# Altium footprint library SamacSys.PcbLib: 1008 footprints (part 16 of 63)
Each footprint in its own frame and in the unit in brackets; x right, y up, seen from the top. Pads: shape width x height; smd on the part's side, far side on the other; paste and mask are expansions set on the pad; w line width, h text height; cw(c..) or ccw(c..) is an arc to the next point about the centre after c.
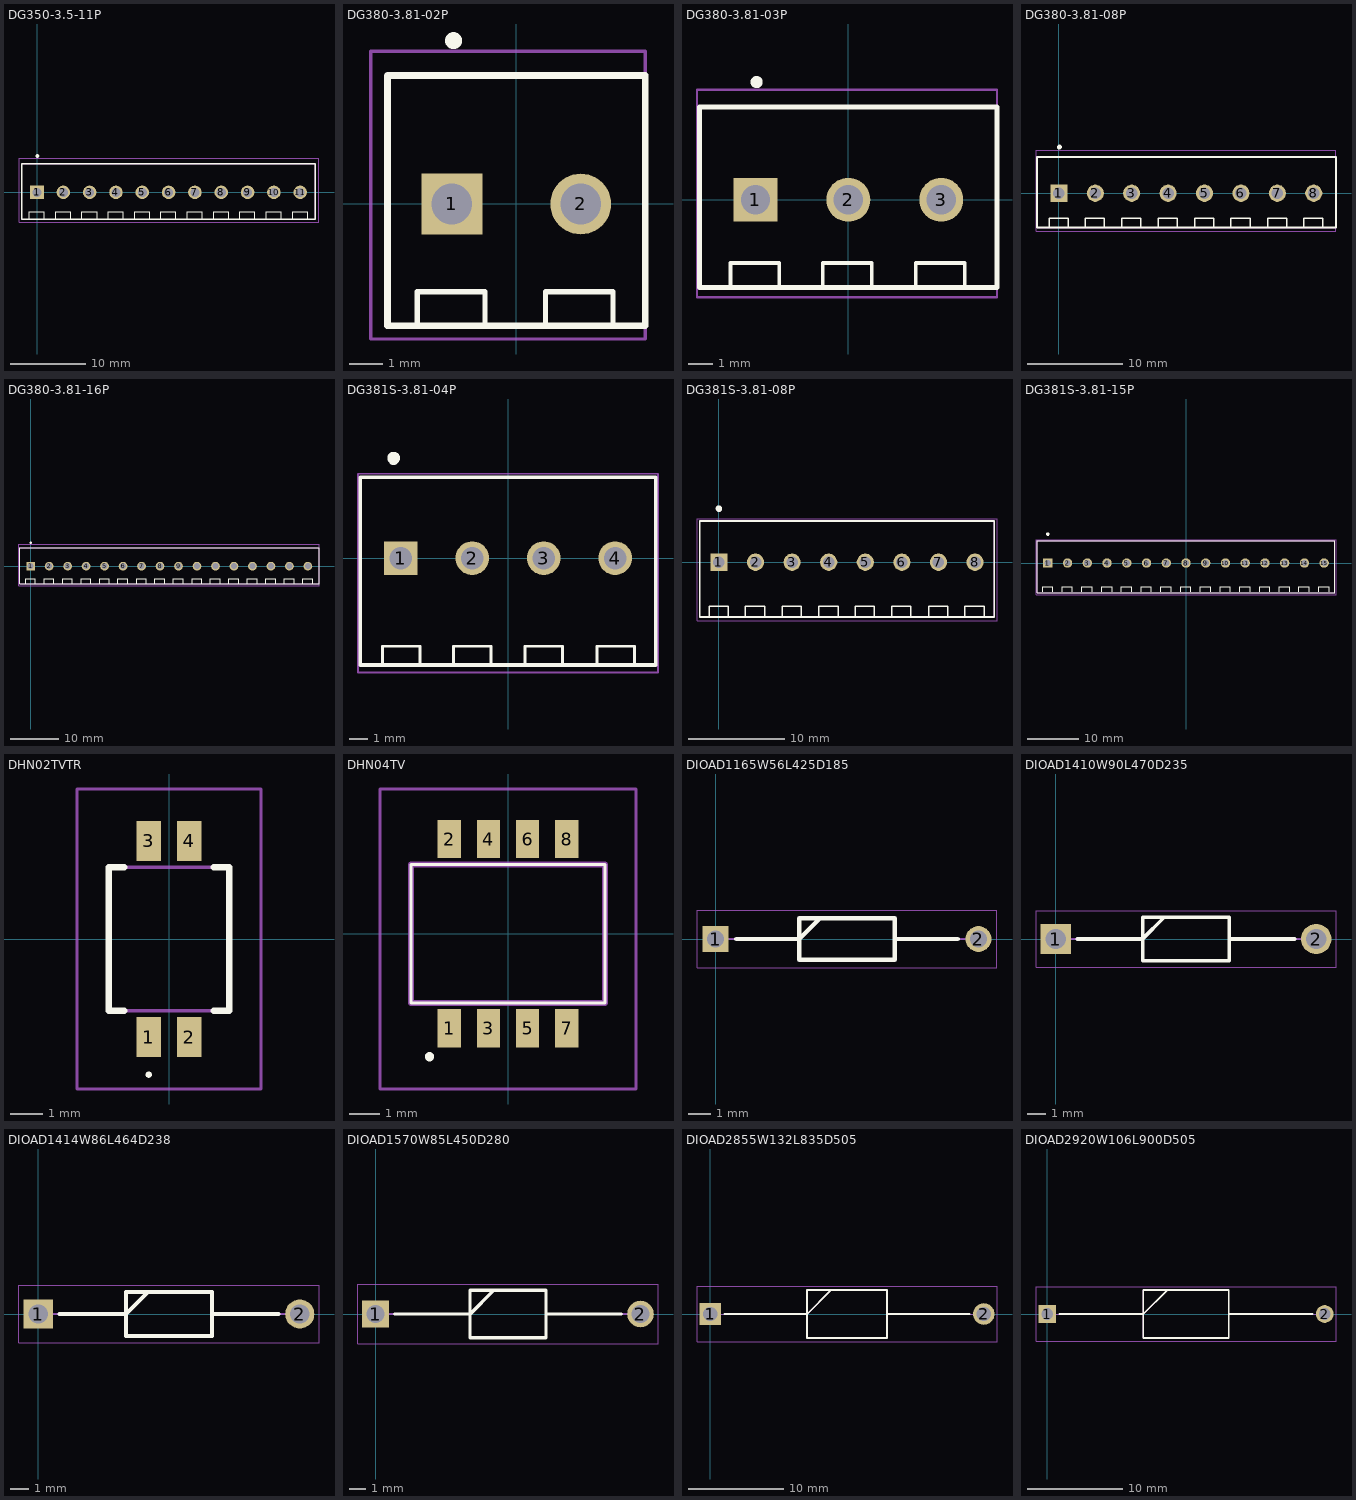
[diagram p15: the footprints below, top view; thin cyan lines are the x and y axes]

## DG350-3.5-11P [mm]
pads (11):
  rect 1.8x1.8 hole 1.2: 1(0,0)
  round 1.8 hole 1.2: 2(3.5,0) 3(7,0) 4(10.5,0) 5(14,0) 6(17.5,0) 7(21,0) 8(24.5,0) 9(28,0) 10(31.5,0) 11(35,0)
Top Overlay:
  lines w0.15: -1.022,-3.594 -1.022,-2.594 0.978,-2.594 0.978,-3.594 ; 2.478,-3.594 2.478,-2.594 4.478,-2.594 4.478,-3.594 ; 5.978,-3.594 5.978,-2.594 7.978,-2.594 7.978,-3.594 ; 9.478,-3.594 9.478,-2.594 11.478,-2.594 11.478,-3.594 ; 12.978,-3.594 12.978,-2.594 14.978,-2.594 14.978,-3.594 ; 16.478,-3.594 16.478,-2.594 18.478,-2.594 18.478,-3.594 ; 19.978,-3.594 19.978,-2.594 21.978,-2.594 21.978,-3.594 ; 23.478,-3.594 23.478,-2.594 25.478,-2.594 25.478,-3.594 ; 26.978,-3.594 26.978,-2.594 28.978,-2.594 28.978,-3.594 ; 30.478,-3.594 30.478,-2.594 32.478,-2.594 32.478,-3.594 ; 33.978,-3.594 33.978,-2.594 35.978,-2.594 35.978,-3.594
  lines w0.2: -2,-3.6 37,-3.6 37,3.8 -2,3.8 -2,-3.6
  lines w0.4: 0,4.826 cw(c0.05,4.826) 0.1,4.826 cw(c0.05,4.826) 0,4.826
Assembly:
  lines w0.1: -2,-3.6 37,-3.6 37,3.8 -2,3.8 -2,-3.6
Countryard:
  lines w0.1: -2.395,-3.991 37.5,-3.991 37.5,4.518 -2.395,4.518 -2.395,-3.991
3D body "DG380-3.5-11P-14-00A&Z(H).stp": height 10.51, standoff -3.49, extent -2,-3.6 37,3.8

## DG380-3.81-02P [mm]
pads (2):
  rect 1.8x1.8 hole 1.2: 1(-1.905,0)
  round 1.8 hole 1.2: 2(1.905,0)
Top Overlay:
  lines w0.15: -2.927,-3.594 -2.927,-2.594 -0.927,-2.594 -0.927,-3.594 ; 0.862,-3.594 0.862,-2.594 2.862,-2.594 2.862,-3.594
  lines w0.2: -3.81,-3.6 -3.81,3.8 3.81,3.8 3.81,-3.6 -3.81,-3.6
  lines w0.4: -1.905,4.826 ccw(c-1.855,4.826) -1.805,4.826 ccw(c-1.855,4.826) -1.905,4.826
Assembly:
  lines w0.1: -3.81,-3.6 3.81,-3.6 3.81,3.8 -3.81,3.8 -3.81,-3.6
Countryard:
  lines w0.1: -4.3,-3.991 -4.3,4.518 3.81,4.518 3.81,-3.991 -4.3,-3.991
3D body "DG381-3.81-02P-14-00A(H).stp": height 8.61, standoff -3.59, extent -4.234,-3.6 3.806,3.8

## DG380-3.81-03P [mm]
pads (3):
  rect 1.8x1.8 hole 1.2: 1(-3.81,0)
  round 1.8 hole 1.2: 2(0,0) 3(3.81,0)
Top Overlay:
  lines w0.15: -4.832,-3.594 -4.832,-2.594 -2.832,-2.594 -2.832,-3.594 ; -1.043,-3.594 -1.043,-2.594 0.957,-2.594 0.957,-3.594 ; 2.767,-3.594 2.767,-2.594 4.767,-2.594 4.767,-3.594
  lines w0.2: -6.096,-3.6 6.096,-3.6 6.096,3.8 -6.096,3.8 -6.096,-3.6
  lines w0.4: -3.81,4.826 cw(c-3.76,4.826) -3.71,4.826 cw(c-3.76,4.826) -3.81,4.826
Assembly:
  lines w0.1: -6.096,-3.6 6.096,-3.6 6.096,3.8 -6.096,3.8 -6.096,-3.6
Countryard:
  lines w0.1: -6.205,-3.991 6.096,-3.991 6.096,4.518 -6.205,4.518 -6.205,-3.991
3D body "DG380-3.81-03P-14-00A(H).stp": height 10.21, standoff -3.49, extent -6.09,-3.6 6.09,3.8

## DG380-3.81-08P [mm]
pads (8):
  rect 1.8x1.8 hole 1.2: 1(0,0)
  round 1.8 hole 1.2: 2(3.81,0) 3(7.62,0) 4(11.43,0) 5(15.24,0) 6(19.05,0) 7(22.86,0) 8(26.67,0)
Top Overlay:
  lines w0.15: -1.022,-3.594 -1.022,-2.594 0.978,-2.594 0.978,-3.594 ; 2.767,-3.594 2.767,-2.594 4.767,-2.594 4.767,-3.594 ; 6.577,-3.594 6.577,-2.594 8.577,-2.594 8.577,-3.594 ; 10.387,-3.594 10.387,-2.594 ; 10.408,-2.594 12.408,-2.594 12.408,-3.594 ; 14.197,-3.594 14.197,-2.594 16.197,-2.594 16.197,-3.594 ; 18.007,-3.594 18.007,-2.594 20.007,-2.594 20.007,-3.594 ; 21.838,-3.594 21.838,-2.594 23.838,-2.594 23.838,-3.594 ; 25.627,-3.594 25.627,-2.594 27.627,-2.594 27.627,-3.594
  lines w0.2: -2.286,-3.6 -2.286,3.8 29,3.8 29,-3.6 -2.286,-3.6
  lines w0.4: 0,4.826 ccw(c0.05,4.826) 0.1,4.826 ccw(c0.05,4.826) 0,4.826
Assembly:
  lines w0.1: -2.286,-3.6 -2.286,3.8 29,3.8 29,-3.6 -2.286,-3.6
Countryard:
  lines w0.1: -2.395,-3.991 -2.395,4.518 29,4.518 29,-3.991 -2.395,-3.991
3D body "DG380-3.81-08P-14-00A(H).stp": height 10.21, standoff -3.49, extent -2.28,-3.6 28.95,3.8

## DG380-3.81-16P [mm]
pads (16):
  rect 1.8x1.8 hole 1.2: 1(0,0)
  round 1.8 hole 1.2: 2(3.81,0) 3(7.62,0) 4(11.43,0) 5(15.24,0) 6(19.05,0) 7(22.86,0) 8(26.67,0) 9(30.48,0) 10(34.29,0) 11(38.1,0) 12(41.91,0) 13(45.72,0) 14(49.53,0) 15(53.34,0) 16(57.15,0)
Top Overlay:
  lines w0.15: -1.022,-3.594 -1.022,-2.594 0.978,-2.594 0.978,-3.594 ; 2.767,-3.594 2.767,-2.594 4.767,-2.594 4.767,-3.594 ; 6.577,-3.594 6.577,-2.594 8.577,-2.594 8.577,-3.594 ; 10.387,-3.594 10.387,-2.594 ; 10.408,-2.594 12.408,-2.594 12.408,-3.594 ; 14.197,-3.594 14.197,-2.594 16.197,-2.594 16.197,-3.594 ; 18.007,-3.594 18.007,-2.594 20.007,-2.594 20.007,-3.594 ; 21.838,-3.594 21.838,-2.594 23.838,-2.594 23.838,-3.594 ; 25.627,-3.594 25.627,-2.594 27.627,-2.594 27.627,-3.594 ; 29.437,-3.594 29.437,-2.594 31.437,-2.594 31.437,-3.594 ; 33.268,-3.594 33.268,-2.594 35.268,-2.594 35.268,-3.594 ; 37.057,-3.594 37.057,-2.594 39.057,-2.594 39.057,-3.594 ; 40.867,-3.594 40.867,-2.594 42.867,-2.594 42.867,-3.594 ; 44.698,-3.594 44.698,-2.594 46.698,-2.594 46.698,-3.594 ; 48.487,-3.594 48.487,-2.594 50.487,-2.594 50.487,-3.594 ; 52.297,-3.594 52.297,-2.594 54.297,-2.594 54.297,-3.594 ; 56.128,-3.594 56.128,-2.594 58.128,-2.594 58.128,-3.594
  lines w0.2: -2.286,-3.6 -2.286,3.8 59.436,3.8 59.436,-3.6 -2.286,-3.6
  lines w0.4: 0,4.826 ccw(c0.05,4.826) 0.1,4.826 ccw(c0.05,4.826) 0,4.826
Assembly:
  lines w0.1: -2.286,-3.6 -2.286,3.8 59.436,3.8 59.436,-3.6 -2.286,-3.6
Countryard:
  lines w0.1: -2.395,-3.991 -2.395,4.518 59.436,4.518 59.436,-3.991 -2.395,-3.991
3D body "DG380-3.81-16P-14-00A(H).stp": height 10.21, standoff -3.49, extent -2.28,-3.6 59.43,3.8

## DG381S-3.81-04P [mm]
pads (4):
  rect 1.8x1.8 hole 1.2: 1(-5.715,0)
  round 1.8 hole 1.2: 2(-1.905,0) 3(1.905,0)
  round 1.8 hole 1.2 unplated: 4(5.715,0)
Top Overlay:
  lines w0.15: -6.689,-5.7 -6.689,-4.7 -4.689,-4.7 -4.689,-5.7 ; -2.9,-5.7 -2.9,-4.7 -0.9,-4.7 -0.9,-5.7 ; 0.91,-5.7 0.91,-4.7 2.91,-4.7 2.91,-5.7 ; 4.741,-5.7 4.741,-4.7 6.741,-4.7 6.741,-5.7
  lines w0.2: -7.874,-5.7 -7.874,4.318 7.874,4.318 7.874,-5.7 -7.874,-5.7
  lines w0.4: -6.146,5.207 ccw(c-6.096,5.207) -6.046,5.207 ccw(c-6.096,5.334) -6.146,5.207
Assembly:
  lines w0.1: -7.874,-5.7 -7.874,4.318 7.874,4.318 7.874,-5.7 -7.874,-5.7
Countryard:
  lines w0.1: -8,-6.096 -8,4.5 8,4.5 8,-6.096 -8,-6.096
3D body "DG381S-3.81-04P-14-00A(H).stp": height 9.63, standoff -3.5, extent -7.715,-5.682 7.715,4.318

## DG381S-3.81-08P [mm]
pads (8):
  rect 1.8x1.8 hole 1.2: 1(0,0)
  round 1.8 hole 1.2: 2(3.81,0) 3(7.62,0)
  round 1.8 hole 1.2 unplated: 4(11.43,0) 5(15.24,0) 6(19.05,0) 7(22.86,0) 8(26.67,0)
Top Overlay:
  lines w0.15: -1.03,-5.572 -1.03,-4.572 0.97,-4.572 0.97,-5.572 ; 2.759,-5.572 2.759,-4.572 4.759,-4.572 4.759,-5.572 ; 6.569,-5.572 6.569,-4.572 8.569,-4.572 8.569,-5.572 ; 10.4,-5.572 10.4,-4.572 12.4,-4.572 12.4,-5.572 ; 14.189,-5.572 14.189,-4.572 16.189,-4.572 16.189,-5.572 ; 17.999,-5.572 17.999,-4.572 19.999,-4.572 19.999,-5.572 ; 21.83,-5.572 21.83,-4.572 23.83,-4.572 23.83,-5.572 ; 25.619,-5.572 25.619,-4.572 27.619,-4.572 27.619,-5.572
  lines w0.2: -2,-5.7 28.67,-5.7 28.67,4.3 -2,4.3 -2,-5.7
  lines w0.4: -0.05,5.461 cw(c0,5.588) 0.05,5.461 cw(c0,5.461) -0.05,5.461
Assembly:
  lines w0.1: -2,-5.7 -2,4.3 28.67,4.3 28.67,-5.7 -2,-5.7
Countryard:
  lines w0.1: -2.286,-6.096 28.956,-6.096 28.956,4.518 -2.286,4.518 -2.286,-6.096
3D body "DG381S-3.81-08P-14-00A(H).stp": height 9.63, standoff -3.5, extent -2,-5.7 28.67,4.3

## DG381S-3.81-15P [mm]
pads (15):
  rect 1.8x1.8 hole 1.2: 1(-26.67,0)
  round 1.8 hole 1.2: 2(-22.86,0) 3(-19.05,0)
  round 1.8 hole 1.2 unplated: 4(-15.24,0) 5(-11.43,0) 6(-7.62,0) 7(-3.81,0) 8(0,0) 9(3.81,0) 10(7.62,0) 11(11.43,0) 12(15.24,0) 13(19.05,0) 14(22.86,0) 15(26.67,0)
Top Overlay:
  lines w0.15: -27.7,-5.572 -27.7,-4.572 -25.7,-4.572 -25.7,-5.572 ; -23.911,-5.572 -23.911,-4.572 -21.911,-4.572 -21.911,-5.572 ; -20.101,-5.572 -20.101,-4.572 -18.101,-4.572 -18.101,-5.572 ; -16.27,-5.572 -16.27,-4.572 -14.27,-4.572 -14.27,-5.572 ; -12.481,-5.572 -12.481,-4.572 -10.481,-4.572 -10.481,-5.572 ; -8.671,-5.572 -8.671,-4.572 -6.671,-4.572 -6.671,-5.572 ; -4.84,-5.572 -4.84,-4.572 -2.84,-4.572 -2.84,-5.572 ; -1.051,-5.572 -1.051,-4.572 0.949,-4.572 0.949,-5.572 ; 2.759,-5.572 2.759,-4.572 4.759,-4.572 4.759,-5.572 ; 6.59,-5.572 6.59,-4.572 8.59,-4.572 8.59,-5.572 ; 10.379,-5.572 10.379,-4.572 12.379,-4.572 12.379,-5.572 ; 14.189,-5.572 14.189,-4.572 16.189,-4.572 16.189,-5.572 ; 18.02,-5.572 18.02,-4.572 20.02,-4.572 20.02,-5.572 ; 21.809,-5.572 21.809,-4.572 23.809,-4.572 23.809,-5.572 ; 25.619,-5.572 25.619,-4.572 27.619,-4.572 27.619,-5.572
  lines w0.2: -28.67,-5.7 28.67,-5.7 28.67,4.3 -28.67,4.3 -28.67,-5.7
  lines w0.4: -26.72,5.461 cw(c-26.67,5.588) -26.62,5.461 cw(c-26.67,5.461) -26.72,5.461
Assembly:
  lines w0.1: -28.67,-5.7 28.67,-5.7 28.67,4.3 -28.67,4.3 -28.67,-5.7
Countryard:
  lines w0.1: -28.956,-6.096 28.956,-6.096 28.956,4.518 -28.956,4.518 -28.956,-6.096
3D body "DG381S-3.81-15P-14-00A(H).stp": height 9.63, standoff -3.5, extent -28.67,-5.7 28.67,4.3

## DHN02TVTR [mm]
pads (4):
  rect 0.76x1.25 smd: 1(-0.635,-3.075) 2(0.635,-3.075) 3(-0.635,3.075) 4(0.635,3.075)
Top Overlay:
  lines w0.1: -0.635,-4.3 ccw(c-0.635,-4.25) -0.635,-4.2 ccw(c-0.635,-4.25) -0.635,-4.3
  lines w0.2: -1.4,-2.25 -1.885,-2.25 -1.885,2.25 -1.4,2.25 ; 1.4,-2.25 1.885,-2.25 1.885,2.25 1.4,2.25
Assembly:
  lines w0.1: -1.885,-2.25 -1.885,2.25 1.885,2.25 1.885,-2.25 -1.885,-2.25
Countryard:
  lines w0.1: -2.885,-4.7 -2.885,4.7 2.885,4.7 2.885,-4.7 -2.885,-4.7
3D body "DHN-02-T-V-T_R.stp": height 1.74, standoff 0, extent -1.885,-3.35 1.885,3.35

## DHN04TV [mm]
pads (8):
  rect 0.76x1.25 smd: 1(-1.905,-3.075) 2(-1.905,3.075) 3(-0.635,-3.075) 4(-0.635,3.075) 5(0.635,-3.075) 6(0.635,3.075) 7(1.905,-3.075) 8(1.905,3.075)
Top Overlay:
  lines w0.1: -3.155,-2.25 3.155,-2.25 3.155,2.25 -3.155,2.25 -3.155,-2.25
  lines w0.2: -2.6,-4 cw(c-2.55,-4) -2.5,-4 cw(c-2.55,-4) -2.6,-4
Assembly:
  lines w0.2: -3.155,-2.25 3.155,-2.25 3.155,2.25 -3.155,2.25 -3.155,-2.25
Countryard:
  lines w0.1: -4.155,-5.05 4.155,-5.05 4.155,4.7 -4.155,4.7 -4.155,-5.05
3D body "DHN-04-T-V.stp": height 1.74, standoff 0, extent -3.15,-3.35 3.15,3.35

## DIOAD1165W56L425D185 [mm]
pads (2):
  rect 1.15x1.15 hole 0.75: 1(0,0)
  round 1.15 hole 0.75: 2(11.7,0)
Top Overlay:
  lines w0.2: 0.925,0 3.725,0 4.65,0.925 ; 7.975,0 10.775,0 ; 3.725,-0.925 3.725,0.925 7.975,0.925 7.975,-0.925 3.725,-0.925
Assembly:
  lines w0.1: 0,0 3.725,0 4.65,0.925 ; 7.975,0 11.7,0 ; 3.725,-0.925 3.725,0.925 7.975,0.925 7.975,-0.925 3.725,-0.925
Countryard:
  lines w0.05: -0.825,-1.275 -0.825,1.275 12.525,1.275 12.525,-1.275 -0.825,-1.275
3D body "1N4148,133.stp": height 1.71, standoff 0.01, extent -24.652,-0.852 36.348,0.858

## DIOAD1410W90L470D235 [mm]
pads (2):
  rect 1.65x1.65 hole 1.1: 1(0,0)
  round 1.65 hole 1.1: 2(14.1,0)
Top Overlay:
  lines w0.2: 1.175,0 4.7,0 5.875,1.175 ; 9.4,0 12.925,0 ; 4.7,-1.175 9.4,-1.175 9.4,1.175 4.7,1.175 4.7,-1.175
Assembly:
  lines w0.1: 0,0 4.7,0 5.875,1.175 ; 9.4,0 14.1,0 ; 4.7,-1.175 9.4,-1.175 9.4,1.175 4.7,1.175 4.7,-1.175
Countryard:
  lines w0.05: -1.075,-1.525 15.175,-1.525 15.175,1.525 -1.075,1.525 -1.075,-1.525
3D body "1N5817.stp": height 2.7, standoff -2.7, extent -0.45,-1.34 14.55,1.34

## DIOAD1414W86L464D238 [mm]
pads (2):
  rect 1.575x1.575 hole 1.05: 1(0,0)
  round 1.575 hole 1.05: 2(14.1,0)
Top Overlay:
  lines w0.2: 1.138,0 4.732,0 5.92,1.188 ; 9.368,0 12.962,0 ; 4.732,-1.188 4.732,1.188 9.368,1.188 9.368,-1.188 4.732,-1.188
Assembly:
  lines w0.1: 0,0 4.732,0 5.92,1.188 ; 9.368,0 14.1,0 ; 4.732,-1.187 4.732,1.188 9.367,1.188 9.367,-1.187 4.732,-1.187
Countryard:
  lines w0.05: -1.038,-1.537 -1.038,1.538 15.137,1.538 15.137,-1.537 -1.038,-1.537
3D body "1N5819RL.stp": height 2.71, standoff -2.71, extent -0.43,-1.345 14.565,1.345

## DIOAD1570W85L450D280 [mm]
pads (2):
  rect 1.575x1.575 hole 1.05: 1(0,0)
  round 1.575 hole 1.05: 2(15.7,0)
Top Overlay:
  lines w0.2: 1.138,0 5.6,0 7,1.4 ; 10.1,0 14.562,0 ; 5.6,-1.4 5.6,1.4 10.1,1.4 10.1,-1.4 5.6,-1.4
Assembly:
  lines w0.1: 0,0 5.6,0 7,1.4 ; 10.1,0 15.7,0 ; 5.6,-1.4 5.6,1.4 10.1,1.4 10.1,-1.4 5.6,-1.4
Countryard:
  lines w0.05: -1.038,-1.75 -1.038,1.75 16.737,1.75 16.737,-1.75 -1.038,-1.75
3D body "1N4740A.stp": height 2.8, standoff -2.8, extent -0.425,-1.39 16.125,1.39

## DIOAD2855W132L835D505 [mm]
pads (2):
  rect 2.25x2.25 hole 1.5: 1(0,0)
  round 2.25 hole 1.5: 2(28.6,0)
Top Overlay:
  lines w0.2: 1.475,0 10.125,0 12.65,2.525 ; 18.475,0 27.125,0 ; 10.125,-2.525 10.125,2.525 18.475,2.525 18.475,-2.525 10.125,-2.525
Assembly:
  lines w0.1: 0,0 10.125,0 12.65,2.525 ; 18.475,0 28.6,0 ; 10.125,-2.525 10.125,2.525 18.475,2.525 18.475,-2.525 10.125,-2.525
Countryard:
  lines w0.05: -1.375,-2.875 -1.375,2.875 29.975,2.875 29.975,-2.875 -1.375,-2.875
3D body "1N5400-E3_54.stp": height 5.29, standoff -5.3, extent -0.66,-2.647 29.21,2.647

## DIOAD2920W106L900D505 [mm]
pads (2):
  rect 1.875x1.875 hole 1.25: 1(0,0)
  round 1.875 hole 1.25: 2(29.2,0)
Top Overlay:
  lines w0.2: 1.288,0 10.1,0 12.625,2.525 ; 19.1,0 27.912,0 ; 10.1,-2.525 10.1,2.525 19.1,2.525 19.1,-2.525 10.1,-2.525
Assembly:
  lines w0.1: 0,0 10.1,0 12.625,2.525 ; 19.1,0 29.2,0 ; 10.1,-2.525 10.1,2.525 19.1,2.525 19.1,-2.525 10.1,-2.525
Countryard:
  lines w0.05: -1.188,-2.875 -1.188,2.875 30.387,2.875 30.387,-2.875 -1.188,-2.875
3D body "1.5KE10A.stp": height 5.39, standoff -2.09, extent -0.505,-2.521 29.705,2.521